# Altium footprint library FootPrintLib_11.PcbLib: 376 footprints (part 18 of 24)
Each footprint in its own frame and in the unit in brackets; x right, y up, seen from the top. Pads: shape width x height; smd on the part's side, far side on the other; paste and mask are expansions set on the pad; w line width, h text height; cw(c..) or ccw(c..) is an arc to the next point about the centre after c.
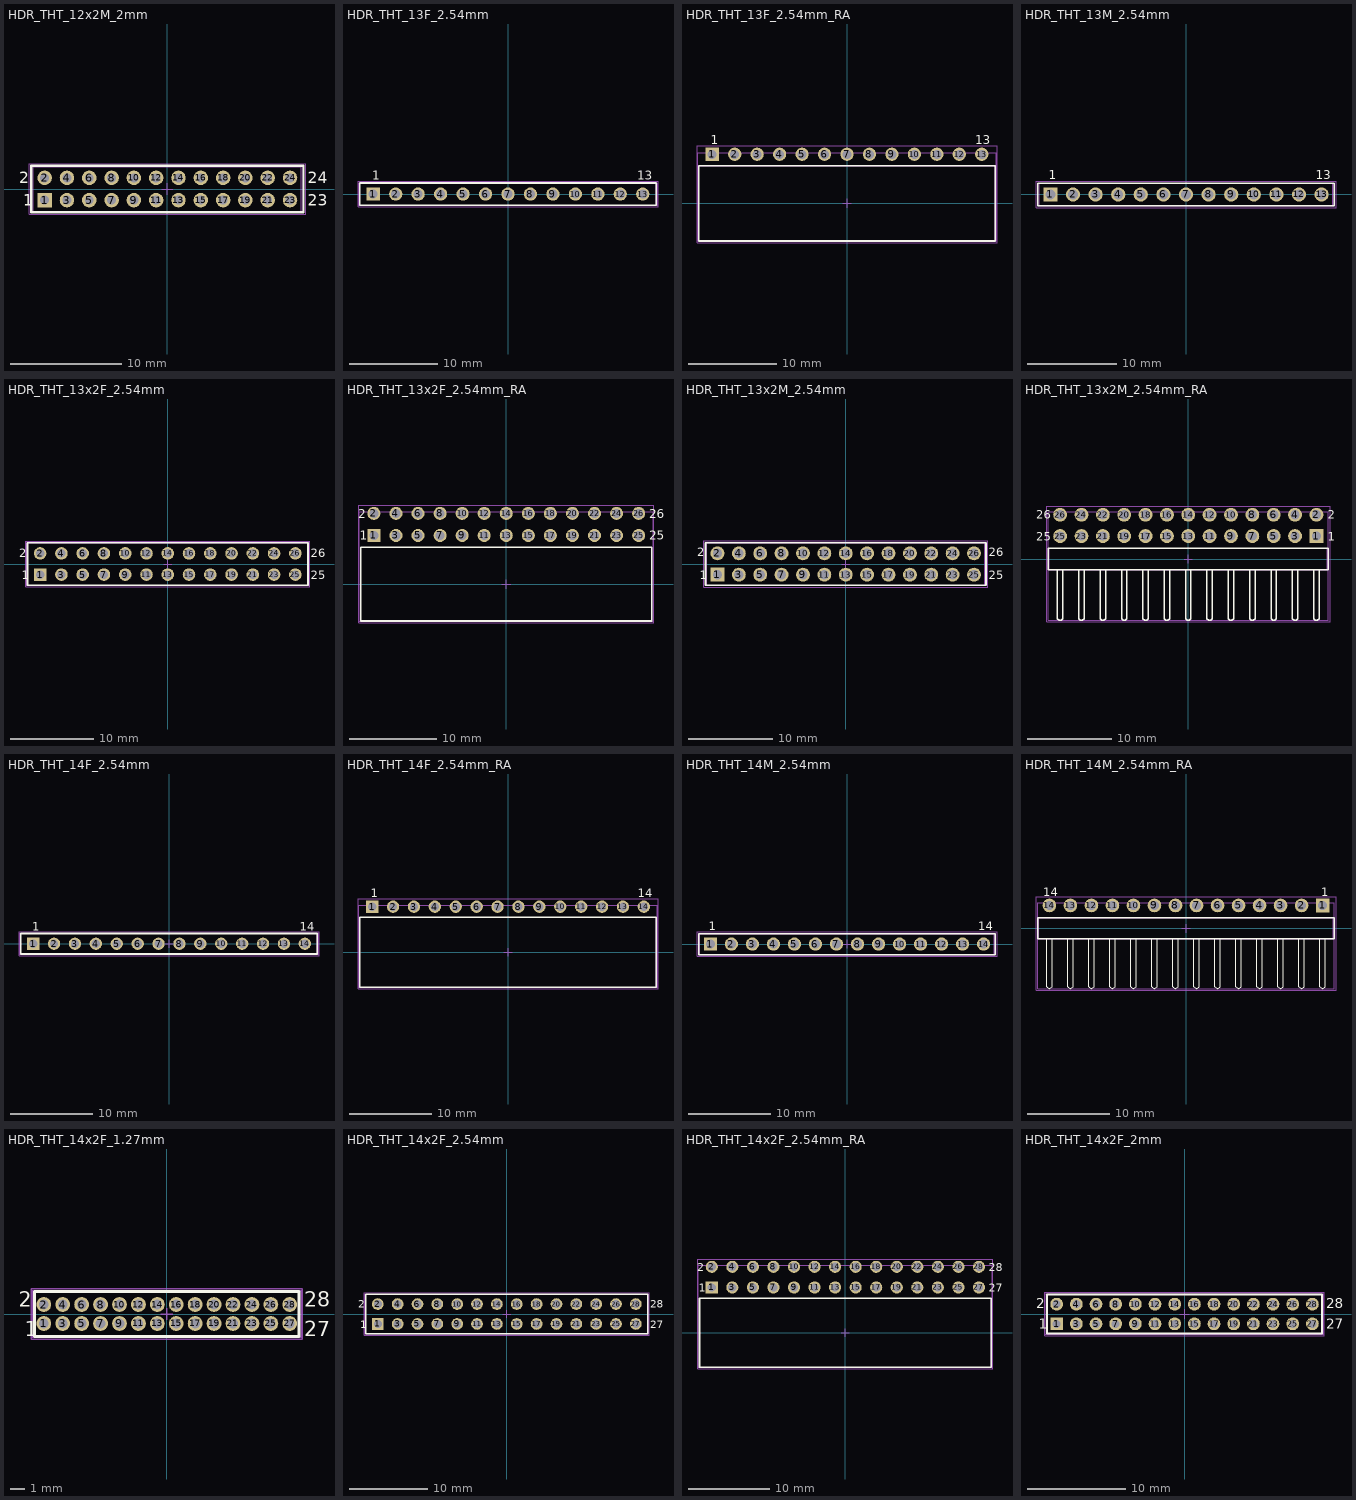
[diagram p17: the footprints below, top view; thin cyan lines are the x and y axes]

## HDR_THT_12x2M_2mm [mm] "2.00 mm THT Dual Pin Header, 24p"
height 6
pads (24):
  rect 1.3x1.3 hole 0.8: 1(-11,-1)
  round 1.3 hole 0.8: 2(-11,1) 3(-9,-1) 4(-9,1) 5(-7,-1) 6(-7,1) 7(-5,-1) 8(-5,1) 9(-3,-1) 10(-3,1) 11(-1,-1) 12(-1,1) 13(1,-1) 14(1,1) 15(3,-1) 16(3,1) 17(5,-1) 18(5,1) 19(7,-1) 20(7,1) 21(9,-1) 22(9,1) 23(11,-1) 24(11,1)
Top Overlay:
  lines w0.2: -12.2,-2.075 -12.2,2.075 12.2,2.075 12.2,-2.075 -12.2,-2.075
  text "1" at -12.9,-1.5 h1
  text "2" at -13.3,0.5 h1
  text "23" at 12.6,-1.5 h1
  text "24" at 12.6,0.5 h1
Mechanical 11:
  lines w0.1: -12,-2 -12,2 12,2 12,-2 -12,-2
Mechanical 13:
  lines w0.1: -12.2,-2.075 -12.2,2.075 12.2,2.075 12.2,-2.075 -12.2,-2.075
Mechanical 15:
  lines w0.1: -0.5,0 0.5,0 ; 0,-0.5 0,0.5 ; -12.4,-2.275 -12.4,2.275 12.4,2.275 12.4,-2.275 -12.4,-2.275
3D body "62002421121.stp": height 6.05, standoff -2.65, extent -12,-2 12,2

## HDR_THT_13F_2.54mm [mm] "Socket Header, Pitch 2.54 mm, THT, Vertical, single row, 13p"
height 8.5
pads (13):
  rect 1.5x1.5 hole 1.02: 1(-15.24,0)
  round 1.5 hole 1.02: 2(-12.7,0) 3(-10.16,0) 4(-7.62,0) 5(-5.08,0) 6(-2.54,0) 7(0,0) 8(2.54,0) 9(5.08,0) 10(7.62,0) 11(10.16,0) 12(12.7,0) 13(15.24,0)
Top Overlay:
  lines w0.2: -16.76,-1.25 16.76,-1.25 16.76,1.25 -16.76,1.25 -16.76,-1.25
  text "13" at 14.61,1.6 h1
  text "1" at -15.33,1.6 h1
Mechanical 11:
  lines w0.1: -16.76,-1.25 16.76,-1.25 16.76,1.25 -16.76,1.25 -16.76,-1.25
Mechanical 13:
  lines w0.1: -16.885,-1.25 -16.885,1.25 16.885,1.25 16.885,-1.25 -16.885,-1.25
Mechanical 15:
  lines w0.1: -0.5,0 0.5,0 ; 0,-0.5 0,0.5 ; -16.96,-1.45 -16.96,1.45 16.96,1.45 16.96,-1.45 -16.96,-1.45
3D body "61301311821.stp": height 8.55, standoff -3.06, extent -16.76,-1.25 16.76,1.25

## HDR_THT_13F_2.54mm_RA [mm] "Socket Header, Pitch 2.54 mm, THT, Angled, single row, 13p"
height 2.5
pads (13):
  rect 1.5x1.5 hole 1.02: 1(-15.24,5.55)
  round 1.5 hole 1.02: 2(-12.7,5.55) 3(-10.16,5.55) 4(-7.62,5.55) 5(-5.08,5.55) 6(-2.54,5.55) 7(0,5.55) 8(2.54,5.55) 9(5.08,5.55) 10(7.62,5.55) 11(10.16,5.55) 12(12.7,5.55) 13(15.24,5.55)
Top Overlay:
  lines w0.2: -16.76,-4.25 -16.76,4.25 16.76,4.25 16.76,-4.25 -16.76,-4.25
  text "1" at -15.4,6.7 h1
  text "13" at 14.5,6.7 h1
Mechanical 11:
  lines w0.1: -16.76,-4.25 16.76,-4.25 16.76,4.25 -16.76,4.25 -16.76,-4.25
Mechanical 13:
  lines w0.1: -16.885,-4.25 -16.885,5.75 16.885,5.75 16.885,-4.25 -16.885,-4.25
Mechanical 15:
  lines w0.1: -0.5,0 0.5,0 ; 0,-0.5 0,0.5 ; -16.96,-4.45 -16.96,6.5 16.96,6.5 16.96,-4.45 -16.96,-4.45
3D body "6130xx143121.stp": height 2.55, standoff -3.04, extent -16.76,-4.25 16.76,5.75

## HDR_THT_13M_2.54mm [mm] "Pin Header, pitch 2.54 mm, THT, Vertical, single row, 13p"
height 8.54
pads (13):
  rect 1.6x1.6 hole 1.1: 1(-15.24,0)
  round 1.6 hole 1.1: 2(-12.7,0) 3(-10.16,0) 4(-7.62,0) 5(-5.08,0) 6(-2.54,0) 7(0,0) 8(2.54,0) 9(5.08,0) 10(7.62,0) 11(10.16,0) 12(12.7,0) 13(15.24,0)
Top Overlay:
  lines w0.2: -16.66,-1.27 -16.66,1.27 16.66,1.27 16.66,-1.27 -16.66,-1.27
  text "13" at 14.61,1.7 h1
  text "1" at -15.43,1.7 h1
Mechanical 11:
  lines w0.1: -16.51,-1.27 16.51,-1.27 16.51,1.27 -16.51,1.27 -16.51,-1.27
Mechanical 13:
  lines w0.1: -16.66,-1.27 -16.66,1.27 16.66,1.27 16.66,-1.27 -16.66,-1.27
Mechanical 15:
  lines w0.1: -0.5,0 0.5,0 ; 0,-0.5 0,0.5 ; -16.86,-1.47 -16.86,1.47 16.86,1.47 16.86,-1.47 -16.86,-1.47
3D body "61301311121.stp": height 8.57, standoff -2.97, extent -16.51,-1.27 16.51,1.27

## HDR_THT_13x2F_2.54mm [mm] "Socket Header, Pitch 2.54 mm, THT, Vertical, dual row, 26p"
height 8.4
pads (26):
  rect 1.5x1.5 hole 1.02: 1(-15.24,-1.27)
  round 1.5 hole 1.02: 2(-15.24,1.27) 3(-12.7,-1.27) 4(-12.7,1.27) 5(-10.16,-1.27) 6(-10.16,1.27) 7(-7.62,-1.27) 8(-7.62,1.27) 9(-5.08,-1.27) 10(-5.08,1.27) 11(-2.54,-1.27) 12(-2.54,1.27) 13(0,-1.27) 14(0,1.27) 15(2.54,-1.27) 16(2.54,1.27) 17(5.08,-1.27) 18(5.08,1.27) 19(7.62,-1.27) 20(7.62,1.27) 21(10.16,-1.27) 22(10.16,1.27) 23(12.7,-1.27) 24(12.7,1.27) 25(15.24,-1.27) 26(15.24,1.27)
Top Overlay:
  lines w0.2: -16.76,-2.54 16.76,-2.54 16.76,2.54 -16.76,2.54 -16.76,-2.54
  text "26" at 17.07,0.8 h1
  text "25" at 17.07,-1.8 h1
  text "1" at -17.47,-1.8 h1
  text "2" at -17.77,0.8 h1
Mechanical 11:
  lines w0.1: -16.76,-2.54 -16.76,2.54 16.76,2.54 16.76,-2.54 -16.76,-2.54
Mechanical 13:
  lines w0.1: -16.885,-2.54 16.885,-2.54 16.885,2.54 -16.885,2.54 -16.885,-2.54
Mechanical 15:
  lines w0.1: -0.5,0 0.5,0 ; 0,-0.5 0,0.5 ; -16.96,-2.74 16.96,-2.74 16.96,2.74 -16.96,2.74 -16.96,-2.74
3D body "61302621821.stp": height 8.45, standoff -3.05, extent -16.76,-2.54 16.76,2.54

## HDR_THT_13x2F_2.54mm_RA [mm] "Socket Header, Pitch 2.54 mm, THT, Angled, dual row, 26p"
height 5.08
pads (26):
  rect 1.5x1.5 hole 1.02: 1(-15.24,5.61)
  round 1.5 hole 1.02: 2(-15.24,8.15) 3(-12.7,5.61) 4(-12.7,8.15) 5(-10.16,5.61) 6(-10.16,8.15) 7(-7.62,5.61) 8(-7.62,8.15) 9(-5.08,5.61) 10(-5.08,8.15) 11(-2.54,5.61) 12(-2.54,8.15) 13(0,5.61) 14(0,8.15) 15(2.54,5.61) 16(2.54,8.15) 17(5.08,5.61) 18(5.08,8.15) 19(7.62,5.61) 20(7.62,8.15) 21(10.16,5.61) 22(10.16,8.15) 23(12.7,5.61) 24(12.7,8.15) 25(15.24,5.61) 26(15.24,8.15)
Top Overlay:
  lines w0.2: -16.76,-4.25 -16.76,4.25 16.76,4.25 16.76,-4.25 -16.76,-4.25
  text "2" at -17.07,7.6 h1
  text "1" at -16.87,5.1 h1
  text "25" at 16.47,5.1 h1
  text "26" at 16.47,7.6 h1
Mechanical 11:
  lines w0.1: -16.76,-4.25 16.76,-4.25 16.76,4.25 -16.76,4.25 -16.76,-4.25
Mechanical 13:
  lines w0.1: -16.91,-4.25 16.91,-4.25 16.91,8.35 -16.91,8.35 -16.91,-4.25
Mechanical 15:
  lines w0.1: -0.5,0 0.5,0 ; 0,-0.5 0,0.5 ; -16.96,-4.45 16.96,-4.45 16.96,9.1 -16.96,9.1 -16.96,-4.45
3D body "613026243121.stp": height 5.05, standoff -3.25, extent -16.76,-4.25 16.76,8.35

## HDR_THT_13x2M_2.54mm [mm] "Pin Header, pitch 2.54 mm, THT, Vertical, dual row, 26p"
height 8.54
pads (26):
  rect 1.65x1.65 hole 1.1: 1(-15.24,-1.27)
  round 1.65 hole 1.1: 2(-15.24,1.27) 3(-12.7,-1.27) 4(-12.7,1.27) 5(-10.16,-1.27) 6(-10.16,1.27) 7(-7.62,-1.27) 8(-7.62,1.27) 9(-5.08,-1.27) 10(-5.08,1.27) 11(-2.54,-1.27) 12(-2.54,1.27) 13(0,-1.27) 14(0,1.27) 15(2.54,-1.27) 16(2.54,1.27) 17(5.08,-1.27) 18(5.08,1.27) 19(7.62,-1.27) 20(7.62,1.27) 21(10.16,-1.27) 22(10.16,1.27) 23(12.7,-1.27) 24(12.7,1.27) 25(15.24,-1.27) 26(15.24,1.27)
Top Overlay:
  lines w0.2: -16.66,-2.54 16.66,-2.54 16.66,2.54 -16.66,2.54 -16.66,-2.54
  text "26" at 16.97,0.9 h1
  text "25" at 16.97,-1.8 h1
  text "1" at -17.37,-1.8 h1
  text "2" at -17.67,0.9 h1
Mechanical 11:
  lines w0.1: -16.51,-2.54 16.51,-2.54 16.51,2.54 -16.51,2.54 -16.51,-2.54
Mechanical 13:
  lines w0.1: -16.66,-2.54 16.66,-2.54 16.66,2.54 -16.66,2.54 -16.66,-2.54
Mechanical 15:
  lines w0.1: -0.5,0 0.5,0 ; 0,-0.5 0,0.5 ; -16.86,-2.74 16.86,-2.74 16.86,2.74 -16.86,2.74 -16.86,-2.74
3D body "61302621121.stp": height 8.59, standoff -2.95, extent -16.51,-2.54 16.51,2.54

## HDR_THT_13x2M_2.54mm_RA [mm] "Pin Header, pitch 2.54 mm, THT, Angled, dual row, 26p"
height 5.08
pads (26):
  rect 1.65x1.65 hole 1.1: 1(15.24,2.73)
  round 1.65 hole 1.1: 2(15.24,5.27) 3(12.7,2.73) 4(12.7,5.27) 5(10.16,2.73) 6(10.16,5.27) 7(7.62,2.73) 8(7.62,5.27) 9(5.08,2.73) 10(5.08,5.27) 11(2.54,2.73) 12(2.54,5.27) 13(0,2.73) 14(0,5.27) 15(-2.54,2.73) 16(-2.54,5.27) 17(-5.08,2.73) 18(-5.08,5.27) 19(-7.62,2.73) 20(-7.62,5.27) 21(-10.16,2.73) 22(-10.16,5.27) 23(-12.7,2.73) 24(-12.7,5.27) 25(-15.24,2.73) 26(-15.24,5.27)
Top Overlay:
  lines w0.15: -15.56,-1.335 -15.56,-7.07 -15.36,-7.27 -15.12,-7.27 -14.92,-7.07 -14.92,-1.31 ; -13.02,-1.335 -13.02,-7.07 -12.82,-7.27 -12.58,-7.27 -12.38,-7.07 -12.38,-1.31 ; -10.48,-1.335 -10.48,-7.07 -10.28,-7.27 -10.04,-7.27 -9.84,-7.07 -9.84,-1.31 ; -7.94,-1.335 -7.94,-7.07 -7.74,-7.27 -7.5,-7.27 -7.3,-7.07 -7.3,-1.31 ; -5.4,-1.335 -5.4,-7.07 -5.2,-7.27 -4.96,-7.27 -4.76,-7.07 -4.76,-1.31 ; -2.86,-1.335 -2.86,-7.07 -2.66,-7.27 -2.42,-7.27 -2.22,-7.07 -2.22,-1.31 ; -0.32,-1.335 -0.32,-7.07 -0.12,-7.27 0.12,-7.27 0.32,-7.07 0.32,-1.31 ; 2.22,-1.335 2.22,-7.07 2.42,-7.27 2.66,-7.27 2.86,-7.07 2.86,-1.31 ; 4.76,-1.335 4.76,-7.07 4.96,-7.27 5.2,-7.27 5.4,-7.07 5.4,-1.31 ; 7.3,-1.335 7.3,-7.07 7.5,-7.27 7.74,-7.27 7.94,-7.07 7.94,-1.31 ; 9.84,-1.335 9.84,-7.07 10.04,-7.27 10.28,-7.27 10.48,-7.07 10.48,-1.31 ; 12.38,-1.335 12.38,-7.07 12.58,-7.27 12.82,-7.27 13.02,-7.07 13.02,-1.31 ; 14.92,-1.335 14.92,-7.07 15.12,-7.27 15.36,-7.27 15.56,-7.07 15.56,-1.31
  lines w0.2: -16.66,-1.27 16.66,-1.27 16.66,1.27 -16.66,1.27 -16.66,-1.27
  text "26" at -18.11,4.8 h1
  text "25" at -18.11,2.2 h1
  text "2" at 16.57,4.8 h1
  text "1" at 16.57,2.2 h1
Mechanical 11:
  lines w0.1: -16.51,-1.27 16.51,-1.27 16.51,1.27 -16.51,1.27 -16.51,-1.27
Mechanical 13:
  lines w0.1: -16.66,-7.27 -16.66,5.63 16.66,5.63 16.66,-7.27 -16.66,-7.27
Mechanical 15:
  lines w0.1: -0.5,0 0.5,0 ; 0,-0.5 0,0.5 ; -16.86,-7.47 -16.86,6.295 16.86,6.295 16.86,-7.47 -16.86,-7.47
3D body "61302621021.stp": height 5.14, standoff -2.94, extent -16.51,-7.27 16.51,5.63

## HDR_THT_14F_2.54mm [mm] "Socket Header, Pitch 2.54 mm, THT, Vertical, single row, 14p"
height 8.5
pads (14):
  rect 1.5x1.5 hole 1.02: 1(-16.51,0)
  round 1.5 hole 1.02: 2(-13.97,0) 3(-11.43,0) 4(-8.89,0) 5(-6.35,0) 6(-3.81,0) 7(-1.27,0) 8(1.27,0) 9(3.81,0) 10(6.35,0) 11(8.89,0) 12(11.43,0) 13(13.97,0) 14(16.51,0)
Top Overlay:
  lines w0.2: -18.03,-1.25 -18.03,1.25 18.03,1.25 18.03,-1.25 -18.03,-1.25
  text "1" at -16.6,1.6 h1
  text "14" at 15.88,1.6 h1
Mechanical 11:
  lines w0.1: -18.03,-1.25 -18.03,1.25 18.03,1.25 18.03,-1.25 -18.03,-1.25
Mechanical 13:
  lines w0.1: -18.155,-1.25 18.155,-1.25 18.155,1.25 -18.155,1.25 -18.155,-1.25
Mechanical 15:
  lines w0.1: -0.5,0 0.5,0 ; 0,-0.5 0,0.5 ; -18.23,-1.45 18.23,-1.45 18.23,1.45 -18.23,1.45 -18.23,-1.45
3D body "61301411821.stp": height 8.55, standoff -3.06, extent -18.03,-1.25 18.03,1.25

## HDR_THT_14F_2.54mm_RA [mm] "Socket Header, Pitch 2.54 mm, THT, Angled, single row, 14p"
height 2.5
pads (14):
  rect 1.5x1.5 hole 1.02: 1(-16.51,5.55)
  round 1.5 hole 1.02: 2(-13.97,5.55) 3(-11.43,5.55) 4(-8.89,5.55) 5(-6.35,5.55) 6(-3.81,5.55) 7(-1.27,5.55) 8(1.27,5.55) 9(3.81,5.55) 10(6.35,5.55) 11(8.89,5.55) 12(11.43,5.55) 13(13.97,5.55) 14(16.51,5.55)
Top Overlay:
  lines w0.2: -18.03,-4.25 -18.03,4.25 18.03,4.25 18.03,-4.25 -18.03,-4.25
  text "1" at -16.67,6.7 h1
  text "14" at 15.77,6.7 h1
Mechanical 11:
  lines w0.1: -18.03,-4.25 18.03,-4.25 18.03,4.25 -18.03,4.25 -18.03,-4.25
Mechanical 13:
  lines w0.1: -18.155,-4.25 -18.155,5.75 18.155,5.75 18.155,-4.25 -18.155,-4.25
Mechanical 15:
  lines w0.1: -0.5,0 0.5,0 ; 0,-0.5 0,0.5 ; -18.23,-4.45 -18.23,6.5 18.23,6.5 18.23,-4.45 -18.23,-4.45
3D body "613014143121.stp": height 2.55, standoff -3.04, extent -18.03,-4.25 18.03,5.75

## HDR_THT_14M_2.54mm [mm] "Pin Header, pitch 2.54 mm, THT, Vertical, single row, 14p"
height 8.54
pads (14):
  rect 1.6x1.6 hole 1.1: 1(-16.51,0)
  round 1.6 hole 1.1: 2(-13.97,0) 3(-11.43,0) 4(-8.89,0) 5(-6.35,0) 6(-3.81,0) 7(-1.27,0) 8(1.27,0) 9(3.81,0) 10(6.35,0) 11(8.89,0) 12(11.43,0) 13(13.97,0) 14(16.51,0)
Top Overlay:
  lines w0.2: -17.93,-1.27 17.93,-1.27 17.93,1.27 -17.93,1.27 -17.93,-1.27
  text "1" at -16.7,1.7 h1
  text "14" at 15.88,1.7 h1
Mechanical 11:
  lines w0.1: -17.78,-1.27 -17.78,1.27 17.78,1.27 17.78,-1.27 -17.78,-1.27
Mechanical 13:
  lines w0.1: -17.93,-1.27 17.93,-1.27 17.93,1.27 -17.93,1.27 -17.93,-1.27
Mechanical 15:
  lines w0.1: -0.5,0 0.5,0 ; 0,-0.5 0,0.5 ; -18.13,-1.47 18.13,-1.47 18.13,1.47 -18.13,1.47 -18.13,-1.47
3D body "61301411121.stp": height 8.57, standoff -2.97, extent -17.78,-1.27 17.78,1.27

## HDR_THT_14M_2.54mm_RA [mm] "Pin Header, pitch 2.54 mm, THT, Angled, single row, 14p"
height 2.54
pads (14):
  rect 1.65x1.65 hole 1.1: 1(16.51,2.77)
  round 1.65 hole 1.1: 2(13.97,2.77) 3(11.43,2.77) 4(8.89,2.77) 5(6.35,2.77) 6(3.81,2.77) 7(1.27,2.77) 8(-1.27,2.77) 9(-3.81,2.77) 10(-6.35,2.77) 11(-8.89,2.77) 12(-11.43,2.77) 13(-13.97,2.77) 14(-16.51,2.77)
Top Overlay:
  lines w0.15: -16.83,-1.27 -16.83,-7.07 -16.51,-7.27 -16.19,-7.07 -16.19,-1.27 ; -14.29,-1.27 -14.29,-7.07 -13.97,-7.27 -13.65,-7.07 -13.65,-1.27 ; -11.75,-1.27 -11.75,-7.07 -11.43,-7.27 -11.11,-7.07 -11.11,-1.27 ; -9.21,-1.27 -9.21,-7.07 -8.89,-7.27 -8.57,-7.07 -8.57,-1.27 ; -6.67,-1.27 -6.67,-7.07 -6.35,-7.27 -6.03,-7.07 -6.03,-1.27 ; -4.13,-1.27 -4.13,-7.07 -3.81,-7.27 -3.49,-7.07 -3.49,-1.27 ; -1.59,-1.27 -1.59,-7.07 -1.27,-7.27 -0.95,-7.07 -0.95,-1.27 ; 0.95,-1.27 0.95,-7.07 1.27,-7.27 1.59,-7.07 1.59,-1.27 ; 3.49,-1.27 3.49,-7.07 3.81,-7.27 4.13,-7.07 4.13,-1.27 ; 6.03,-1.27 6.03,-7.07 6.35,-7.27 6.67,-7.07 6.67,-1.27 ; 8.57,-1.27 8.57,-7.07 8.89,-7.27 9.21,-7.07 9.21,-1.27 ; 11.11,-1.27 11.11,-7.07 11.43,-7.27 11.75,-7.07 11.75,-1.27 ; 13.65,-1.27 13.65,-7.07 13.97,-7.27 14.29,-7.07 14.29,-1.27 ; 16.19,-1.27 16.19,-7.07 16.51,-7.27 16.83,-7.07 16.83,-1.27
  lines w0.2: -17.93,-1.27 17.93,-1.27 17.93,1.27 -17.93,1.27 -17.93,-1.27
  text "14" at -17.28,3.9 h1
  text "1" at 16.34,3.9 h1
Mechanical 11:
  lines w0.1: -17.78,-1.27 17.78,-1.27 17.78,1.27 -17.78,1.27 -17.78,-1.27
Mechanical 13:
  lines w0.1: -17.93,-7.27 -17.93,3.09 17.93,3.09 17.93,-7.27 -17.93,-7.27
Mechanical 15:
  lines w0.1: -0.5,0 0.5,0 ; 0,-0.5 0,0.5 ; -18.13,-7.47 -18.13,3.795 18.13,3.795 18.13,-7.47 -18.13,-7.47
3D body "61301411021.stp": height 2.62, standoff -2.92, extent -17.78,-7.27 17.78,3.09

## HDR_THT_14x2F_1.27mm [mm] "Socket Header, Pitch 1.27 mm, THT, Vertical, dual row, 28p"
height 4.65
pads (28):
  round 1 hole 0.65: 1(-8.255,-0.635) 2(-8.255,0.635) 3(-6.985,-0.635) 4(-6.985,0.635) 5(-5.715,-0.635) 6(-5.715,0.635) 7(-4.445,-0.635) 8(-4.445,0.635) 9(-3.175,-0.635) 10(-3.175,0.635) 11(-1.905,-0.635) 12(-1.905,0.635) 13(-0.635,-0.635) 14(-0.635,0.635) 15(0.635,-0.635) 16(0.635,0.635) 17(1.905,-0.635) 18(1.905,0.635) 19(3.175,-0.635) 20(3.175,0.635) 21(4.445,-0.635) 22(4.445,0.635) 23(5.715,-0.635) 24(5.715,0.635) 25(6.985,-0.635) 26(6.985,0.635) 27(8.255,-0.635) 28(8.255,0.635)
Top Overlay:
  lines w0.2: -8.89,-1.5 8.89,-1.5 8.89,1.5 -8.89,1.5 -8.89,-1.5
  text "2" at -9.92,0.5 h1
  text "1" at -9.52,-1.5 h1
  text "27" at 9.22,-1.5 h1
  text "28" at 9.22,0.5 h1
Mechanical 11:
  lines w0.1: -8.89,-1.5 8.89,-1.5 8.89,1.5 -8.89,1.5 -8.89,-1.5
Mechanical 13:
  lines w0.1: -9.015,-1.575 -9.015,1.575 9.015,1.575 9.015,-1.575 -9.015,-1.575
Mechanical 15:
  lines w0.1: -0.4,0 0.4,0 ; 0,-0.4 0,0.4 ; -9.09,-1.7 9.09,-1.7 9.09,1.7 -9.09,1.7 -9.09,-1.7
3D body "62202821821.stp": height 4.55, standoff -2.15, extent -9.09,-1.5 9.09,1.5

## HDR_THT_14x2F_2.54mm [mm] "Socket Header, Pitch 2.54 mm, THT, Vertical, dual row, 28p"
height 8.4
pads (28):
  rect 1.5x1.5 hole 1.02: 1(-16.51,-1.27)
  round 1.5 hole 1.02: 2(-16.51,1.27) 3(-13.97,-1.27) 4(-13.97,1.27) 5(-11.43,-1.27) 6(-11.43,1.27) 7(-8.89,-1.27) 8(-8.89,1.27) 9(-6.35,-1.27) 10(-6.35,1.27) 11(-3.81,-1.27) 12(-3.81,1.27) 13(-1.27,-1.27) 14(-1.27,1.27) 15(1.27,-1.27) 16(1.27,1.27) 17(3.81,-1.27) 18(3.81,1.27) 19(6.35,-1.27) 20(6.35,1.27) 21(8.89,-1.27) 22(8.89,1.27) 23(11.43,-1.27) 24(11.43,1.27) 25(13.97,-1.27) 26(13.97,1.27) 27(16.51,-1.27) 28(16.51,1.27)
Top Overlay:
  lines w0.2: -18.03,-2.54 -18.03,2.54 18.03,2.54 18.03,-2.54 -18.03,-2.54
  text "2" at -19.04,0.8 h1
  text "1" at -18.74,-1.8 h1
  text "27" at 18.34,-1.8 h1
  text "28" at 18.34,0.8 h1
Mechanical 11:
  lines w0.1: -18.03,-2.54 18.03,-2.54 18.03,2.54 -18.03,2.54 -18.03,-2.54
Mechanical 13:
  lines w0.1: -18.155,-2.54 -18.155,2.54 18.155,2.54 18.155,-2.54 -18.155,-2.54
Mechanical 15:
  lines w0.1: -0.5,0 0.5,0 ; 0,-0.5 0,0.5 ; -18.23,-2.74 -18.23,2.74 18.23,2.74 18.23,-2.74 -18.23,-2.74
3D body "61302821821.stp": height 8.45, standoff -3.05, extent -18.03,-2.54 18.03,2.54

## HDR_THT_14x2F_2.54mm_RA [mm] "Socket Header, Pitch 2.54 mm, THT, Angled, dual row, 28p"
height 5.08
pads (28):
  rect 1.5x1.5 hole 1.02: 1(-16.51,5.61)
  round 1.5 hole 1.02: 2(-16.51,8.15) 3(-13.97,5.61) 4(-13.97,8.15) 5(-11.43,5.61) 6(-11.43,8.15) 7(-8.89,5.61) 8(-8.89,8.15) 9(-6.35,5.61) 10(-6.35,8.15) 11(-3.81,5.61) 12(-3.81,8.15) 13(-1.27,5.61) 14(-1.27,8.15) 15(1.27,5.61) 16(1.27,8.15) 17(3.81,5.61) 18(3.81,8.15) 19(6.35,5.61) 20(6.35,8.15) 21(8.89,5.61) 22(8.89,8.15) 23(11.43,5.61) 24(11.43,8.15) 25(13.97,5.61) 26(13.97,8.15) 27(16.51,5.61) 28(16.51,8.15)
Top Overlay:
  lines w0.2: -18.03,-4.25 -18.03,4.25 18.03,4.25 18.03,-4.25 -18.03,-4.25
  text "28" at 17.74,7.6 h1
  text "27" at 17.74,5.1 h1
  text "2" at -18.34,7.6 h1
  text "1" at -18.14,5.1 h1
Mechanical 11:
  lines w0.1: -18.03,-4.25 18.03,-4.25 18.03,4.25 -18.03,4.25 -18.03,-4.25
Mechanical 13:
  lines w0.1: -18.18,-4.25 18.18,-4.25 18.18,8.35 -18.18,8.35 -18.18,-4.25
Mechanical 15:
  lines w0.1: -0.5,0 0.5,0 ; 0,-0.5 0,0.5 ; -18.23,-4.45 18.23,-4.45 18.23,9.1 -18.23,9.1 -18.23,-4.45
3D body "613028243121.stp": height 5.05, standoff -3.25, extent -18.03,-4.25 18.03,8.35

## HDR_THT_14x2F_2mm [mm] "Socket Header, Pitch 2.00 mm, THT, Vertical, dual row, 28p"
height 4.45
pads (28):
  rect 1.3x1.3 hole 0.8: 1(-13,-1)
  round 1.3 hole 0.8: 2(-13,1) 3(-11,-1) 4(-11,1) 5(-9,-1) 6(-9,1) 7(-7,-1) 8(-7,1) 9(-5,-1) 10(-5,1) 11(-3,-1) 12(-3,1) 13(-1,-1) 14(-1,1) 15(1,-1) 16(1,1) 17(3,-1) 18(3,1) 19(5,-1) 20(5,1) 21(7,-1) 22(7,1) 23(9,-1) 24(9,1) 25(11,-1) 26(11,1) 27(13,-1) 28(13,1)
Top Overlay:
  lines w0.2: -14,-2 -14,2 14,2 14,-2 -14,-2
  text "1" at -14.8,-1.5 h1
  text "2" at -15.1,0.6 h1
  text "28" at 14.4,0.6 h1
  text "27" at 14.4,-1.5 h1
Mechanical 11:
  lines w0.1: -14,-2 -14,2 14,2 14,-2 -14,-2
Mechanical 13:
  lines w0.1: -14.15,-2.075 -14.15,2.075 14.15,2.075 14.15,-2.075 -14.15,-2.075
Mechanical 15:
  lines w0.1: -0.5,0 0.5,0 ; 0,-0.5 0,0.5 ; -14.2,-2.2 -14.2,2.2 14.2,2.2 14.2,-2.2 -14.2,-2.2
3D body "62002821821.stp": height 4.35, standoff -2.35, extent -14.25,-2 14.25,2